# Altium schematic symbol library WR-TBL_Pluggable Connector.SchLib: 879 symbols (part 8 of 15)
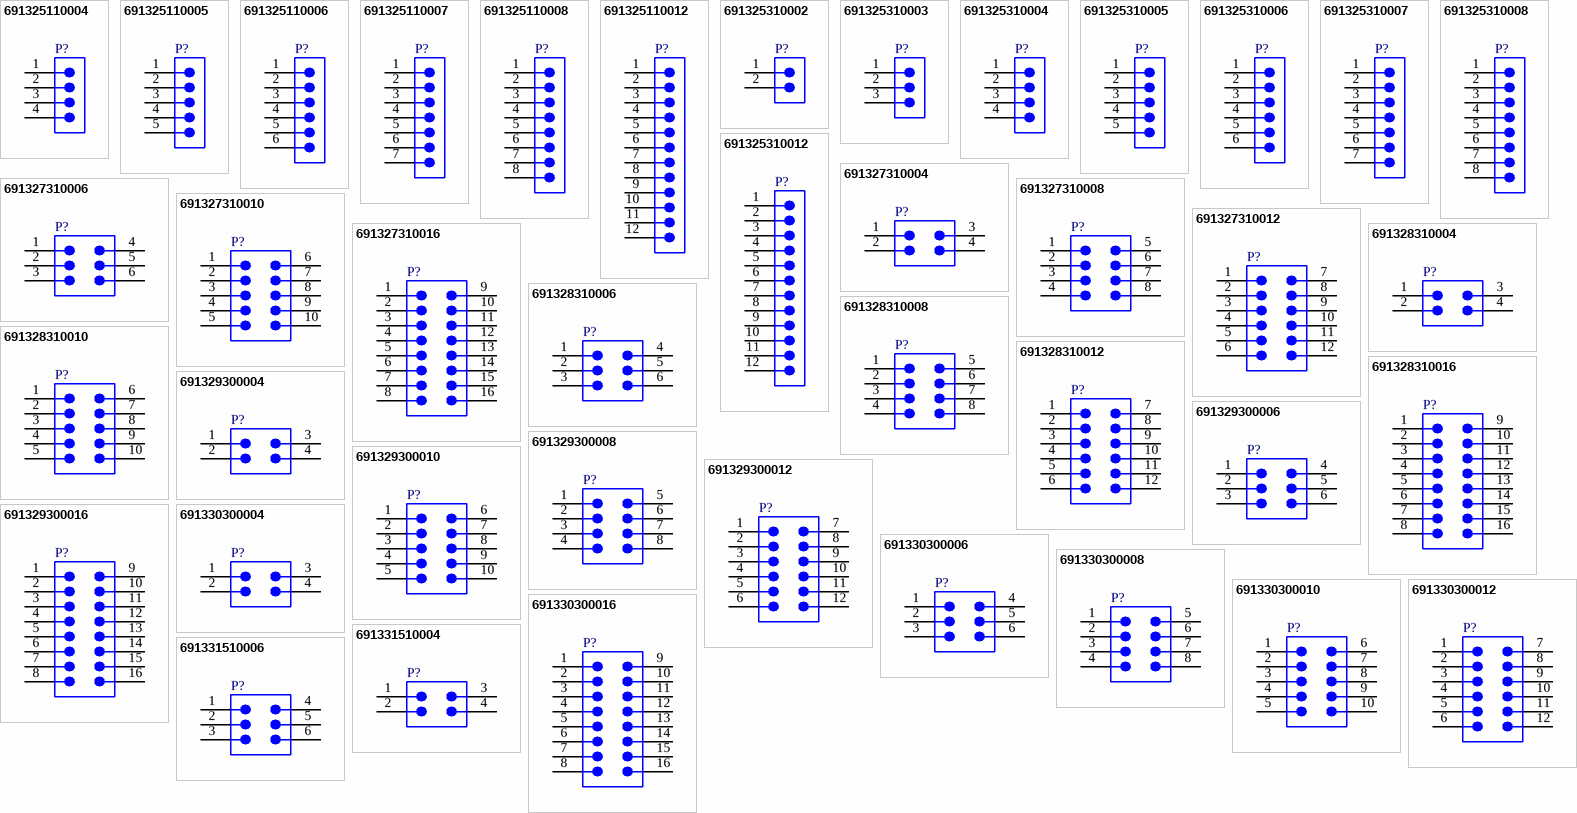
[diagram p28: symbols 691325110004 to 691331510006]

## 691325310004
designator P?  (value not drawn)
WR-TBL Series 3253 Horizontal PCB Header with Flanges, THT, pitch 3.81mm, 04p; Manufacturer: Wurth Elektronik; Modularity: No; Rated Current: 10A; Working Voltage: 300V (AC); Manufacturer Part Number: 691325310004; Product Series: WR-TBL; ComponentLink1Description: Website Link; ComponentLink1URL: https://www.we-online.com; ComponentLink2Description: Datasheet Link; ComponentLink2URL: https://www.we-online.com/components/products/datasheet/691325310004; Mount: Through Hole; Operating Temperature Min: -40degC; Operating Temperature Max: 105degC; Packaging: Box; Application: Pluggable; Number of Pins: 4; Number of Rows: 1; Orientation: Horizontal; Lead Pitch: 3.81mm
footprint 691325310004
pins: 1, 2, 3, 4

## 691325310005
designator P?  (value not drawn)
WR-TBL Series 3253 Horizontal PCB Header with Flanges, THT, pitch 3.81mm, 05p; Manufacturer: Wurth Elektronik; Modularity: No; Rated Current: 10A; Working Voltage: 300V (AC); Manufacturer Part Number: 691325310005; Product Series: WR-TBL; ComponentLink1Description: Website Link; ComponentLink1URL: https://www.we-online.com; ComponentLink2Description: Datasheet Link; ComponentLink2URL: https://www.we-online.com/components/products/datasheet/691325310005; Mount: Through Hole; Operating Temperature Min: -40degC; Operating Temperature Max: 105degC; Packaging: Box; Application: Pluggable; Number of Pins: 5; Number of Rows: 1; Orientation: Horizontal; Lead Pitch: 3.81mm
footprint 691325310005
pins: 1, 2, 3, 4, 5

## 691325310006
designator P?  (value not drawn)
WR-TBL Series 3253 Horizontal PCB Header with Flanges, THT, pitch 3.81mm, 06p; Manufacturer: Wurth Elektronik; Modularity: No; Rated Current: 10A; Working Voltage: 300V (AC); Manufacturer Part Number: 691325310006; Product Series: WR-TBL; ComponentLink1Description: Website Link; ComponentLink1URL: https://www.we-online.com; ComponentLink2Description: Datasheet Link; ComponentLink2URL: https://www.we-online.com/components/products/datasheet/691325310006; Mount: Through Hole; Operating Temperature Min: -40degC; Operating Temperature Max: 105degC; Packaging: Box; Application: Pluggable; Number of Pins: 6; Number of Rows: 1; Orientation: Horizontal; Lead Pitch: 3.81mm
footprint 691325310006
pins: 1, 2, 3, 4, 5, 6

## 691325310007
designator P?  (value not drawn)
WR-TBL Series 3253 Horizontal PCB Header with Flanges, THT, pitch 3.81mm, 07p; Manufacturer: Wurth Elektronik; Modularity: No; Rated Current: 10A; Working Voltage: 300V (AC); Manufacturer Part Number: 691325310007; Product Series: WR-TBL; ComponentLink1Description: Website Link; ComponentLink1URL: https://www.we-online.com; ComponentLink2Description: Datasheet Link; ComponentLink2URL: https://www.we-online.com/components/products/datasheet/691325310007; Mount: Through Hole; Operating Temperature Min: -40degC; Operating Temperature Max: 105degC; Packaging: Box; Application: Pluggable; Number of Pins: 7; Number of Rows: 1; Orientation: Horizontal; Lead Pitch: 3.81mm
footprint 691325310007
pins: 1, 2, 3, 4, 5, 6, 7

## 691325310008
designator P?  (value not drawn)
WR-TBL Series 3253 Horizontal PCB Header with Flanges, THT, pitch 3.81mm, 08p; Manufacturer: Wurth Elektronik; Modularity: No; Rated Current: 10A; Working Voltage: 300V (AC); Manufacturer Part Number: 691325310008; Product Series: WR-TBL; ComponentLink1Description: Website Link; ComponentLink1URL: https://www.we-online.com; ComponentLink2Description: Datasheet Link; ComponentLink2URL: https://www.we-online.com/components/products/datasheet/691325310008; Mount: Through Hole; Operating Temperature Min: -40degC; Operating Temperature Max: 105degC; Packaging: Box; Application: Pluggable; Number of Pins: 8; Number of Rows: 1; Orientation: Horizontal; Lead Pitch: 3.81mm
footprint 691325310008
pins: 1, 2, 3, 4, 5, 6, 7, 8

## 691325310012
designator P?  (value not drawn)
WR-TBL Series 3253 Horizontal PCB Header with Flanges, THT, pitch 3.81mm, 12p; Manufacturer: Wurth Elektronik; Modularity: No; Rated Current: 10A; Working Voltage: 300V (AC); Manufacturer Part Number: 691325310012; Product Series: WR-TBL; ComponentLink1Description: Website Link; ComponentLink1URL: https://www.we-online.com; ComponentLink2Description: Datasheet Link; ComponentLink2URL: https://www.we-online.com/components/products/datasheet/691325310012; Mount: Through Hole; Operating Temperature Min: -40degC; Operating Temperature Max: 105degC; Packaging: Box; Application: Pluggable; Number of Pins: 12; Number of Rows: 1; Orientation: Horizontal; Lead Pitch: 3.81mm
footprint 691325310012
pins: 1, 2, 3, 4, 5, 6, 7, 8, 9, 10, 11, 12

## 691327310004
designator P?  (value not drawn)
WR-TBL Series 3273 Double Level Horizontal PCB Header with Flanges, THT, pitch 3.81mm, 04p; Manufacturer: Wurth Elektronik; Modularity: No; Rated Current: 10A; Working Voltage: 300V (AC); Manufacturer Part Number: 691327310004; Product Series: WR-TBL; ComponentLink1Description: Website Link; ComponentLink1URL: https://www.we-online.com; ComponentLink2Description: Datasheet Link; ComponentLink2URL: https://www.we-online.com/components/products/datasheet/691327310004; Mount: Through Hole; Operating Temperature Min: -40degC; Operating Temperature Max: 105degC; Packaging: Box; Application: Pluggable; Number of Pins: 4; Number of Rows: 2; Orientation: Double Level Horizontal; Lead Pitch: 3.81mm
footprint 691327310004
pins: 1, 2, 3, 4

## 691327310006
designator P?  (value not drawn)
WR-TBL Series 3273 Double Level Horizontal PCB Header with Flanges, THT, pitch 3.81mm, 06p; Manufacturer: Wurth Elektronik; Modularity: No; Rated Current: 10A; Working Voltage: 300V (AC); Manufacturer Part Number: 691327310006; Product Series: WR-TBL; ComponentLink1Description: Website Link; ComponentLink1URL: https://www.we-online.com; ComponentLink2Description: Datasheet Link; ComponentLink2URL: https://www.we-online.com/components/products/datasheet/691327310006; Mount: Through Hole; Operating Temperature Min: -40degC; Operating Temperature Max: 105degC; Packaging: Box; Application: Pluggable; Number of Pins: 6; Number of Rows: 2; Orientation: Double Level Horizontal; Lead Pitch: 3.81mm
footprint 691327310006
pins: 1, 2, 3, 4, 5, 6

## 691327310008
designator P?  (value not drawn)
WR-TBL Series 3273 Double Level Horizontal PCB Header with Flanges, THT, pitch 3.81mm, 08p; Manufacturer: Wurth Elektronik; Modularity: No; Rated Current: 10A; Working Voltage: 300V (AC); Manufacturer Part Number: 691327310008; Product Series: WR-TBL; ComponentLink1Description: Website Link; ComponentLink1URL: https://www.we-online.com; ComponentLink2Description: Datasheet Link; ComponentLink2URL: https://www.we-online.com/components/products/datasheet/691327310008; Mount: Through Hole; Operating Temperature Min: -40degC; Operating Temperature Max: 105degC; Packaging: Box; Application: Pluggable; Number of Pins: 8; Number of Rows: 2; Orientation: Double Level Horizontal; Lead Pitch: 3.81mm
footprint 691327310008
pins: 1, 2, 3, 4, 5, 6, 7, 8

## 691327310010
designator P?  (value not drawn)
WR-TBL Series 3273 Double Level Horizontal PCB Header with Flanges, THT, pitch 3.81mm, 10p; Manufacturer: Wurth Elektronik; Modularity: No; Rated Current: 10A; Working Voltage: 300V (AC); Manufacturer Part Number: 691327310010; Product Series: WR-TBL; ComponentLink1Description: Website Link; ComponentLink1URL: https://www.we-online.com; ComponentLink2Description: Datasheet Link; ComponentLink2URL: https://www.we-online.com/components/products/datasheet/691327310010; Mount: Through Hole; Operating Temperature Min: -40degC; Operating Temperature Max: 105degC; Packaging: Box; Application: Pluggable; Number of Pins: 10; Number of Rows: 2; Orientation: Double Level Horizontal; Lead Pitch: 3.81mm
footprint 691327310010
pins: 1, 2, 3, 4, 5, 6, 7, 8, 9, 10

## 691327310012
designator P?  (value not drawn)
WR-TBL Series 3273 Double Level Horizontal PCB Header with Flanges, THT, pitch 3.81mm, 12p; Manufacturer: Wurth Elektronik; Modularity: No; Rated Current: 10A; Working Voltage: 300V (AC); Manufacturer Part Number: 691327310012; Product Series: WR-TBL; ComponentLink1Description: Website Link; ComponentLink1URL: https://www.we-online.com; ComponentLink2Description: Datasheet Link; ComponentLink2URL: https://www.we-online.com/components/products/datasheet/691327310012; Mount: Through Hole; Operating Temperature Min: -40degC; Operating Temperature Max: 105degC; Packaging: Box; Application: Pluggable; Number of Pins: 12; Number of Rows: 2; Orientation: Double Level Horizontal; Lead Pitch: 3.81mm
footprint 691327310012
pins: 1, 2, 3, 4, 5, 6, 7, 8, 9, 10, 11, 12

## 691327310016
designator P?  (value not drawn)
WR-TBL Series 3273 Double Level Horizontal PCB Header with Flanges, THT, pitch 3.81mm, 16p; Manufacturer: Wurth Elektronik; Modularity: No; Rated Current: 10A; Working Voltage: 300V (AC); Manufacturer Part Number: 691327310016; Product Series: WR-TBL; ComponentLink1Description: Website Link; ComponentLink1URL: https://www.we-online.com; ComponentLink2Description: Datasheet Link; ComponentLink2URL: https://www.we-online.com/components/products/datasheet/691327310016; Mount: Through Hole; Operating Temperature Min: -40degC; Operating Temperature Max: 105degC; Packaging: Box; Application: Pluggable; Number of Pins: 16; Number of Rows: 2; Orientation: Double Level Horizontal; Lead Pitch: 3.81mm
footprint 691327310016
pins: 1, 2, 3, 4, 5, 6, 7, 8, 9, 10, 11, 12, 13, 14, 15, 16

## 691328310004
designator P?  (value not drawn)
WR-TBL Series 3283 Double Level Horizontal PCB Header with Flanges & Nut Type, THT, pitch 3.81mm, 04p; Manufacturer: Wurth Elektronik; Modularity: No; Rated Current: 10A; Working Voltage: 300V (AC); Manufacturer Part Number: 691328310004; Product Series: WR-TBL; ComponentLink1Description: Website Link; ComponentLink1URL: https://www.we-online.com; ComponentLink2Description: Datasheet Link; ComponentLink2URL: https://www.we-online.com/components/products/datasheet/691328310004; Mount: Through Hole; Operating Temperature Min: -40degC; Operating Temperature Max: 105degC; Packaging: Box; Application: Pluggable; Number of Pins: 4; Number of Rows: 2; Orientation: Double Level Horizontal; Lead Pitch: 3.81mm
footprint 691328310004
pins: 1, 2, 3, 4

## 691328310006
designator P?  (value not drawn)
WR-TBL Series 3283 Double Level Horizontal PCB Header with Flanges & Nut Type, THT, pitch 3.81mm, 06p; Manufacturer: Wurth Elektronik; Modularity: No; Rated Current: 10A; Working Voltage: 300V (AC); Manufacturer Part Number: 691328310006; Product Series: WR-TBL; ComponentLink1Description: Website Link; ComponentLink1URL: https://www.we-online.com; ComponentLink2Description: Datasheet Link; ComponentLink2URL: https://www.we-online.com/components/products/datasheet/691328310006; Mount: Through Hole; Operating Temperature Min: -40degC; Operating Temperature Max: 105degC; Packaging: Box; Application: Pluggable; Number of Pins: 6; Number of Rows: 2; Orientation: Double Level Horizontal; Lead Pitch: 3.81mm
footprint 691328310006
pins: 1, 2, 3, 4, 5, 6

## 691328310008
designator P?  (value not drawn)
WR-TBL Series 3283 Double Level Horizontal PCB Header with Flanges & Nut Type, THT, pitch 3.81mm, 08p; Manufacturer: Wurth Elektronik; Modularity: No; Rated Current: 10A; Working Voltage: 300V (AC); Manufacturer Part Number: 691328310008; Product Series: WR-TBL; ComponentLink1Description: Website Link; ComponentLink1URL: https://www.we-online.com; ComponentLink2Description: Datasheet Link; ComponentLink2URL: https://www.we-online.com/components/products/datasheet/691328310008; Mount: Through Hole; Operating Temperature Min: -40degC; Operating Temperature Max: 105degC; Packaging: Box; Application: Pluggable; Number of Pins: 8; Number of Rows: 2; Orientation: Double Level Horizontal; Lead Pitch: 3.81mm
footprint 691328310008
pins: 1, 2, 3, 4, 5, 6, 7, 8

## 691328310010
designator P?  (value not drawn)
WR-TBL Series 3283 Double Level Horizontal PCB Header with Flanges & Nut Type, THT, pitch 3.81mm, 10p; Manufacturer: Wurth Elektronik; Modularity: No; Rated Current: 10A; Working Voltage: 300V (AC); Manufacturer Part Number: 691328310010; Product Series: WR-TBL; ComponentLink1Description: Website Link; ComponentLink1URL: https://www.we-online.com; ComponentLink2Description: Datasheet Link; ComponentLink2URL: https://www.we-online.com/components/products/datasheet/691328310010; Mount: Through Hole; Operating Temperature Min: -40degC; Operating Temperature Max: 105degC; Packaging: Box; Application: Pluggable; Number of Pins: 10; Number of Rows: 2; Orientation: Double Level Horizontal; Lead Pitch: 3.81mm
footprint 691328310010
pins: 1, 2, 3, 4, 5, 6, 7, 8, 9, 10

## 691328310012
designator P?  (value not drawn)
WR-TBL Series 3283 Double Level Horizontal PCB Header with Flanges & Nut Type, THT, pitch 3.81mm, 12p; Manufacturer: Wurth Elektronik; Modularity: No; Rated Current: 10A; Working Voltage: 300V (AC); Manufacturer Part Number: 691328310012; Product Series: WR-TBL; ComponentLink1Description: Website Link; ComponentLink1URL: https://www.we-online.com; ComponentLink2Description: Datasheet Link; ComponentLink2URL: https://www.we-online.com/components/products/datasheet/691328310012; Mount: Through Hole; Operating Temperature Min: -40degC; Operating Temperature Max: 105degC; Packaging: Box; Application: Pluggable; Number of Pins: 12; Number of Rows: 2; Orientation: Double Level Horizontal; Lead Pitch: 3.81mm
footprint 691328310012
pins: 1, 2, 3, 4, 5, 6, 7, 8, 9, 10, 11, 12

## 691328310016
designator P?  (value not drawn)
WR-TBL Series 3283 Double Level Horizontal PCB Header with Flanges & Nut Type, THT, pitch 3.81mm, 16p; Manufacturer: Wurth Elektronik; Modularity: No; Rated Current: 10A; Working Voltage: 300V (AC); Manufacturer Part Number: 691328310016; Product Series: WR-TBL; ComponentLink1Description: Website Link; ComponentLink1URL: https://www.we-online.com; ComponentLink2Description: Datasheet Link; ComponentLink2URL: https://www.we-online.com/components/products/datasheet/691328310016; Mount: Through Hole; Operating Temperature Min: -40degC; Operating Temperature Max: 105degC; Packaging: Box; Application: Pluggable; Number of Pins: 16; Number of Rows: 2; Orientation: Double Level Horizontal; Lead Pitch: 3.81mm
footprint 691328310016
pins: 1, 2, 3, 4, 5, 6, 7, 8, 9, 10, 11, 12, 13, 14, 15, 16

## 691329300004
designator P?  (value not drawn)
WR-TBL Series 3293 Double Level Vertical PCB Header, THT, pitch 3.81mm, 04p; Manufacturer: Wurth Elektronik; Modularity: No; Rated Current: 10A; Working Voltage: 300V (AC); Manufacturer Part Number: 691329300004; Product Series: WR-TBL; ComponentLink1Description: Website Link; ComponentLink1URL: https://www.we-online.com; ComponentLink2Description: Datasheet Link; ComponentLink2URL: https://www.we-online.com/components/products/datasheet/691329300004; Mount: Through Hole; Operating Temperature Min: -40degC; Operating Temperature Max: 105degC; Packaging: Box; Application: Pluggable; Number of Pins: 4; Number of Rows: 2; Orientation: Double Level Vertical; Lead Pitch: 3.81mm
footprint 691329300004
pins: 1, 2, 3, 4

## 691329300006
designator P?  (value not drawn)
WR-TBL Series 3293 Double Level Vertical PCB Header, THT, pitch 3.81mm, 06p; Manufacturer: Wurth Elektronik; Modularity: No; Rated Current: 10A; Working Voltage: 300V (AC); Manufacturer Part Number: 691329300006; Product Series: WR-TBL; ComponentLink1Description: Website Link; ComponentLink1URL: https://www.we-online.com; ComponentLink2Description: Datasheet Link; ComponentLink2URL: https://www.we-online.com/components/products/datasheet/691329300006; Mount: Through Hole; Operating Temperature Min: -40degC; Operating Temperature Max: 105degC; Packaging: Box; Application: Pluggable; Number of Pins: 6; Number of Rows: 2; Orientation: Double Level Vertical; Lead Pitch: 3.81mm
footprint 691329300006
pins: 1, 2, 3, 4, 5, 6

## 691329300008
designator P?  (value not drawn)
WR-TBL Series 3293 Double Level Vertical PCB Header, THT, pitch 3.81mm, 08p; Manufacturer: Wurth Elektronik; Modularity: No; Rated Current: 10A; Working Voltage: 300V (AC); Manufacturer Part Number: 691329300008; Product Series: WR-TBL; ComponentLink1Description: Website Link; ComponentLink1URL: https://www.we-online.com; ComponentLink2Description: Datasheet Link; ComponentLink2URL: https://www.we-online.com/components/products/datasheet/691329300008; Mount: Through Hole; Operating Temperature Min: -40degC; Operating Temperature Max: 105degC; Packaging: Box; Application: Pluggable; Number of Pins: 8; Number of Rows: 2; Orientation: Double Level Vertical; Lead Pitch: 3.81mm
footprint 691329300008
pins: 1, 2, 3, 4, 5, 6, 7, 8

## 691329300010
designator P?  (value not drawn)
WR-TBL Series 3293 Double Level Vertical PCB Header, THT, pitch 3.81mm, 10p; Manufacturer: Wurth Elektronik; Modularity: No; Rated Current: 10A; Working Voltage: 300V (AC); Manufacturer Part Number: 691329300010; Product Series: WR-TBL; ComponentLink1Description: Website Link; ComponentLink1URL: https://www.we-online.com; ComponentLink2Description: Datasheet Link; ComponentLink2URL: https://www.we-online.com/components/products/datasheet/691329300010; Mount: Through Hole; Operating Temperature Min: -40degC; Operating Temperature Max: 105degC; Packaging: Box; Application: Pluggable; Number of Pins: 10; Number of Rows: 2; Orientation: Double Level Vertical; Lead Pitch: 3.81mm
footprint 691329300010
pins: 1, 2, 3, 4, 5, 6, 7, 8, 9, 10

## 691329300012
designator P?  (value not drawn)
WR-TBL Series 3293 Double Level Vertical PCB Header, THT, pitch 3.81mm, 12p; Manufacturer: Wurth Elektronik; Modularity: No; Rated Current: 10A; Working Voltage: 300V (AC); Manufacturer Part Number: 691329300012; Product Series: WR-TBL; ComponentLink1Description: Website Link; ComponentLink1URL: https://www.we-online.com; ComponentLink2Description: Datasheet Link; ComponentLink2URL: https://www.we-online.com/components/products/datasheet/691329300012; Mount: Through Hole; Operating Temperature Min: -40degC; Operating Temperature Max: 105degC; Packaging: Box; Application: Pluggable; Number of Pins: 12; Number of Rows: 2; Orientation: Double Level Vertical; Lead Pitch: 3.81mm
footprint 691329300012
pins: 1, 2, 3, 4, 5, 6, 7, 8, 9, 10, 11, 12

## 691329300016
designator P?  (value not drawn)
WR-TBL Series 3293 Double Level Vertical PCB Header, THT, pitch 3.81mm, 16p; Manufacturer: Wurth Elektronik; Modularity: No; Rated Current: 10A; Working Voltage: 300V (AC); Manufacturer Part Number: 691329300016; Product Series: WR-TBL; ComponentLink1Description: Website Link; ComponentLink1URL: https://www.we-online.com; ComponentLink2Description: Datasheet Link; ComponentLink2URL: https://www.we-online.com/components/products/datasheet/691329300016; Mount: Through Hole; Operating Temperature Min: -40degC; Operating Temperature Max: 105degC; Packaging: Box; Application: Pluggable; Number of Pins: 16; Number of Rows: 2; Orientation: Double Level Vertical; Lead Pitch: 3.81mm
footprint 691329300016
pins: 1, 2, 3, 4, 5, 6, 7, 8, 9, 10, 11, 12, 13, 14, 15, 16

## 691330300004
designator P?  (value not drawn)
WR-TBL Series 3303 Double Level Vertical PCB Header with Flanges & Nut Type, THT, pitch 3.81mm, 04p; Manufacturer: Wurth Elektronik; Modularity: No; Rated Current: 10A; Working Voltage: 300V (AC); Manufacturer Part Number: 691330300004; Product Series: WR-TBL; ComponentLink1Description: Website Link; ComponentLink1URL: https://www.we-online.com; ComponentLink2Description: Datasheet Link; ComponentLink2URL: https://www.we-online.com/components/products/datasheet/691330300004; Mount: Through Hole; Operating Temperature Min: -40degC; Operating Temperature Max: 105degC; Packaging: Box; Application: Pluggable; Number of Pins: 4; Number of Rows: 2; Orientation: Double Level Vertical; Lead Pitch: 3.81mm
footprint 691330300004
pins: 1, 2, 3, 4

## 691330300006
designator P?  (value not drawn)
WR-TBL Series 3303 Double Level Vertical PCB Header with Flanges & Nut Type, THT, pitch 3.81mm, 06p; Manufacturer: Wurth Elektronik; Modularity: No; Rated Current: 10A; Working Voltage: 300V (AC); Manufacturer Part Number: 691330300006; Product Series: WR-TBL; ComponentLink1Description: Website Link; ComponentLink1URL: https://www.we-online.com; ComponentLink2Description: Datasheet Link; ComponentLink2URL: https://www.we-online.com/components/products/datasheet/691330300006; Mount: Through Hole; Operating Temperature Min: -40degC; Operating Temperature Max: 105degC; Packaging: Box; Application: Pluggable; Number of Pins: 6; Number of Rows: 2; Orientation: Double Level Vertical; Lead Pitch: 3.81mm
footprint 691330300006
pins: 1, 2, 3, 4, 5, 6

## 691330300008
designator P?  (value not drawn)
WR-TBL Series 3303 Double Level Vertical PCB Header with Flanges & Nut Type, THT, pitch 3.81mm, 08p; Manufacturer: Wurth Elektronik; Modularity: No; Rated Current: 10A; Working Voltage: 300V (AC); Manufacturer Part Number: 691330300008; Product Series: WR-TBL; ComponentLink1Description: Website Link; ComponentLink1URL: https://www.we-online.com; ComponentLink2Description: Datasheet Link; ComponentLink2URL: https://www.we-online.com/components/products/datasheet/691330300008; Mount: Through Hole; Operating Temperature Min: -40degC; Operating Temperature Max: 105degC; Packaging: Box; Application: Pluggable; Number of Pins: 8; Number of Rows: 2; Orientation: Double Level Vertical; Lead Pitch: 3.81mm
footprint 691330300008
pins: 1, 2, 3, 4, 5, 6, 7, 8

## 691330300010
designator P?  (value not drawn)
WR-TBL Series 3303 Double Level Vertical PCB Header with Flanges & Nut Type, THT, pitch 3.81mm, 10p; Manufacturer: Wurth Elektronik; Modularity: No; Rated Current: 10A; Working Voltage: 300V (AC); Manufacturer Part Number: 691330300010; Product Series: WR-TBL; ComponentLink1Description: Website Link; ComponentLink1URL: https://www.we-online.com; ComponentLink2Description: Datasheet Link; ComponentLink2URL: https://www.we-online.com/components/products/datasheet/691330300010; Mount: Through Hole; Operating Temperature Min: -40degC; Operating Temperature Max: 105degC; Packaging: Box; Application: Pluggable; Number of Pins: 10; Number of Rows: 2; Orientation: Double Level Vertical; Lead Pitch: 3.81mm
footprint 691330300010
pins: 1, 2, 3, 4, 5, 6, 7, 8, 9, 10

## 691330300012
designator P?  (value not drawn)
WR-TBL Series 3303 Double Level Vertical PCB Header with Flanges & Nut Type, THT, pitch 3.81mm, 12p; Manufacturer: Wurth Elektronik; Modularity: No; Rated Current: 10A; Working Voltage: 300V (AC); Manufacturer Part Number: 691330300012; Product Series: WR-TBL; ComponentLink1Description: Website Link; ComponentLink1URL: https://www.we-online.com; ComponentLink2Description: Datasheet Link; ComponentLink2URL: https://www.we-online.com/components/products/datasheet/691330300012; Mount: Through Hole; Operating Temperature Min: -40degC; Operating Temperature Max: 105degC; Packaging: Box; Application: Pluggable; Number of Pins: 12; Number of Rows: 2; Orientation: Double Level Vertical; Lead Pitch: 3.81mm
footprint 691330300012
pins: 1, 2, 3, 4, 5, 6, 7, 8, 9, 10, 11, 12

## 691330300016
designator P?  (value not drawn)
WR-TBL Series 3303 Double Level Vertical PCB Header with Flanges & Nut Type, THT, pitch 3.81mm, 16p; Manufacturer: Wurth Elektronik; Modularity: No; Rated Current: 10A; Working Voltage: 300V (AC); Manufacturer Part Number: 691330300016; Product Series: WR-TBL; ComponentLink1Description: Website Link; ComponentLink1URL: https://www.we-online.com; ComponentLink2Description: Datasheet Link; ComponentLink2URL: https://www.we-online.com/components/products/datasheet/691330300016; Mount: Through Hole; Operating Temperature Min: -40degC; Operating Temperature Max: 105degC; Packaging: Box; Application: Pluggable; Number of Pins: 16; Number of Rows: 2; Orientation: Double Level Vertical; Lead Pitch: 3.81mm
footprint 691330300016
pins: 1, 2, 3, 4, 5, 6, 7, 8, 9, 10, 11, 12, 13, 14, 15, 16

## 691331510004
designator P?  (value not drawn)
WR-TBL Series 3315 Double Level Horizontal PCB Header with Flanges, THT, pitch 5.08mm, 04p; Manufacturer: Wurth Elektronik; Modularity: No; Rated Current: 20A; Working Voltage: 300V (AC); Manufacturer Part Number: 691331510004; Product Series: WR-TBL; ComponentLink1Description: Website Link; ComponentLink1URL: https://www.we-online.com; ComponentLink2Description: Datasheet Link; ComponentLink2URL: https://www.we-online.com/components/products/datasheet/691331510004; Mount: Through Hole; Operating Temperature Min: -40degC; Operating Temperature Max: 105degC; Packaging: Box; Application: Pluggable; Number of Pins: 4; Number of Rows: 2; Orientation: Double Level Horizontal; Lead Pitch: 5.08mm
footprint 691331510004
pins: 1, 2, 3, 4

## 691331510006
designator P?  (value not drawn)
WR-TBL Series 3315 Double Level Horizontal PCB Header with Flanges, THT, pitch 5.08mm, 06p; Manufacturer: Wurth Elektronik; Modularity: No; Rated Current: 20A; Working Voltage: 300V (AC); Manufacturer Part Number: 691331510006; Product Series: WR-TBL; ComponentLink1Description: Website Link; ComponentLink1URL: https://www.we-online.com; ComponentLink2Description: Datasheet Link; ComponentLink2URL: https://www.we-online.com/components/products/datasheet/691331510006; Mount: Through Hole; Operating Temperature Min: -40degC; Operating Temperature Max: 105degC; Packaging: Box; Application: Pluggable; Number of Pins: 6; Number of Rows: 2; Orientation: Double Level Horizontal; Lead Pitch: 5.08mm
footprint 691331510006
pins: 1, 2, 3, 4, 5, 6

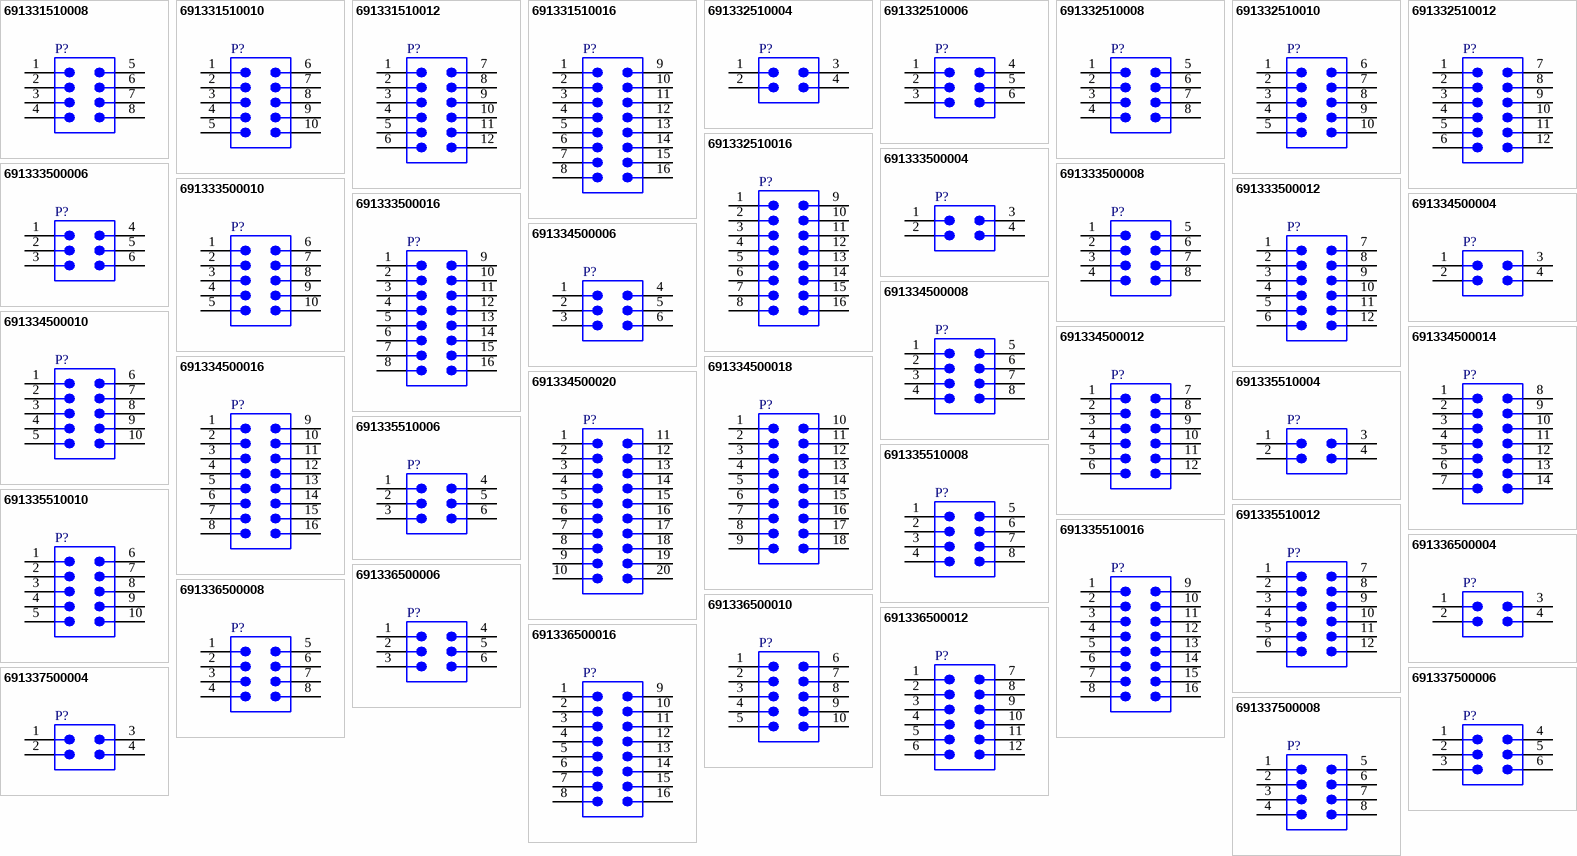
[diagram p12: symbols 691331510008 to 691337500008]

## 691331510008
designator P?  (value not drawn)
WR-TBL Series 3315 Double Level Horizontal PCB Header with Flanges, THT, pitch 5.08mm, 08p; Manufacturer: Wurth Elektronik; Modularity: No; Rated Current: 20A; Working Voltage: 300V (AC); Manufacturer Part Number: 691331510008; Product Series: WR-TBL; ComponentLink1Description: Website Link; ComponentLink1URL: https://www.we-online.com; ComponentLink2Description: Datasheet Link; ComponentLink2URL: https://www.we-online.com/components/products/datasheet/691331510008; Mount: Through Hole; Operating Temperature Min: -40degC; Operating Temperature Max: 105degC; Packaging: Box; Application: Pluggable; Number of Pins: 8; Number of Rows: 2; Orientation: Double Level Horizontal; Lead Pitch: 5.08mm
footprint 691331510008
pins: 1, 2, 3, 4, 5, 6, 7, 8

## 691331510010
designator P?  (value not drawn)
WR-TBL Series 3315 Double Level Horizontal PCB Header with Flanges, THT, pitch 5.08mm, 10p; Manufacturer: Wurth Elektronik; Modularity: No; Rated Current: 20A; Working Voltage: 300V (AC); Manufacturer Part Number: 691331510010; Product Series: WR-TBL; ComponentLink1Description: Website Link; ComponentLink1URL: https://www.we-online.com; ComponentLink2Description: Datasheet Link; ComponentLink2URL: https://www.we-online.com/components/products/datasheet/691331510010; Mount: Through Hole; Operating Temperature Min: -40degC; Operating Temperature Max: 105degC; Packaging: Box; Application: Pluggable; Number of Pins: 10; Number of Rows: 2; Orientation: Double Level Horizontal; Lead Pitch: 5.08mm
footprint 691331510010
pins: 1, 2, 3, 4, 5, 6, 7, 8, 9, 10

## 691331510012
designator P?  (value not drawn)
WR-TBL Series 3315 Double Level Horizontal PCB Header with Flanges, THT, pitch 5.08mm, 12p; Manufacturer: Wurth Elektronik; Modularity: No; Rated Current: 20A; Working Voltage: 300V (AC); Manufacturer Part Number: 691331510012; Product Series: WR-TBL; ComponentLink1Description: Website Link; ComponentLink1URL: https://www.we-online.com; ComponentLink2Description: Datasheet Link; ComponentLink2URL: https://www.we-online.com/components/products/datasheet/691331510012; Mount: Through Hole; Operating Temperature Min: -40degC; Operating Temperature Max: 105degC; Packaging: Box; Application: Pluggable; Number of Pins: 12; Number of Rows: 2; Orientation: Double Level Horizontal; Lead Pitch: 5.08mm
footprint 691331510012
pins: 1, 2, 3, 4, 5, 6, 7, 8, 9, 10, 11, 12

## 691331510016
designator P?  (value not drawn)
WR-TBL Series 3315 Double Level Horizontal PCB Header with Flanges, THT, pitch 5.08mm, 16p; Manufacturer: Wurth Elektronik; Modularity: No; Rated Current: 20A; Working Voltage: 300V (AC); Manufacturer Part Number: 691331510016; Product Series: WR-TBL; ComponentLink1Description: Website Link; ComponentLink1URL: https://www.we-online.com; ComponentLink2Description: Datasheet Link; ComponentLink2URL: https://www.we-online.com/components/products/datasheet/691331510016; Mount: Through Hole; Operating Temperature Min: -40degC; Operating Temperature Max: 105degC; Packaging: Box; Application: Pluggable; Number of Pins: 16; Number of Rows: 2; Orientation: Double Level Horizontal; Lead Pitch: 5.08mm
footprint 691331510016
pins: 1, 2, 3, 4, 5, 6, 7, 8, 9, 10, 11, 12, 13, 14, 15, 16

## 691332510004
designator P?  (value not drawn)
WR-TBL Series 3325 Double Level Horizontal PCB Header with Flanges & Nut Type, THT, pitch 5.08mm, 04p; Manufacturer: Wurth Elektronik; Modularity: No; Rated Current: 20A; Working Voltage: 300V (AC); Manufacturer Part Number: 691332510004; Product Series: WR-TBL; ComponentLink1Description: Website Link; ComponentLink1URL: https://www.we-online.com; ComponentLink2Description: Datasheet Link; ComponentLink2URL: https://www.we-online.com/components/products/datasheet/691332510004; Mount: Through Hole; Operating Temperature Min: -40degC; Operating Temperature Max: 105degC; Packaging: Box; Application: Pluggable; Number of Pins: 4; Number of Rows: 2; Orientation: Double Level Horizontal; Lead Pitch: 5.08mm
footprint 691332510004
pins: 1, 2, 3, 4

## 691332510006
designator P?  (value not drawn)
WR-TBL Series 3325 Double Level Horizontal PCB Header with Flanges & Nut Type, THT, pitch 5.08mm, 06p; Manufacturer: Wurth Elektronik; Modularity: No; Rated Current: 20A; Working Voltage: 300V (AC); Manufacturer Part Number: 691332510006; Product Series: WR-TBL; ComponentLink1Description: Website Link; ComponentLink1URL: https://www.we-online.com; ComponentLink2Description: Datasheet Link; ComponentLink2URL: https://www.we-online.com/components/products/datasheet/691332510006; Mount: Through Hole; Operating Temperature Min: -40degC; Operating Temperature Max: 105degC; Packaging: Box; Application: Pluggable; Number of Pins: 6; Number of Rows: 2; Orientation: Double Level Horizontal; Lead Pitch: 5.08mm
footprint 691332510006
pins: 1, 2, 3, 4, 5, 6

## 691332510008
designator P?  (value not drawn)
WR-TBL Series 3325 Double Level Horizontal PCB Header with Flanges & Nut Type, THT, pitch 5.08mm, 08p; Manufacturer: Wurth Elektronik; Modularity: No; Rated Current: 20A; Working Voltage: 300V (AC); Manufacturer Part Number: 691332510008; Product Series: WR-TBL; ComponentLink1Description: Website Link; ComponentLink1URL: https://www.we-online.com; ComponentLink2Description: Datasheet Link; ComponentLink2URL: https://www.we-online.com/components/products/datasheet/691332510008; Mount: Through Hole; Operating Temperature Min: -40degC; Operating Temperature Max: 105degC; Packaging: Box; Application: Pluggable; Number of Pins: 8; Number of Rows: 2; Orientation: Double Level Horizontal; Lead Pitch: 5.08mm
footprint 691332510008
pins: 1, 2, 3, 4, 5, 6, 7, 8

## 691332510010
designator P?  (value not drawn)
WR-TBL Series 3325 Double Level Horizontal PCB Header with Flanges & Nut Type, THT, pitch 5.08mm, 10p; Manufacturer: Wurth Elektronik; Modularity: No; Rated Current: 20A; Working Voltage: 300V (AC); Manufacturer Part Number: 691332510010; Product Series: WR-TBL; ComponentLink1Description: Website Link; ComponentLink1URL: https://www.we-online.com; ComponentLink2Description: Datasheet Link; ComponentLink2URL: https://www.we-online.com/components/products/datasheet/691332510010; Mount: Through Hole; Operating Temperature Min: -40degC; Operating Temperature Max: 105degC; Packaging: Box; Application: Pluggable; Number of Pins: 10; Number of Rows: 2; Orientation: Double Level Horizontal; Lead Pitch: 5.08mm
footprint 691332510010
pins: 1, 2, 3, 4, 5, 6, 7, 8, 9, 10

## 691332510012
designator P?  (value not drawn)
WR-TBL Series 3325 Double Level Horizontal PCB Header with Flanges & Nut Type, THT, pitch 5.08mm, 12p; Manufacturer: Wurth Elektronik; Modularity: No; Rated Current: 20A; Working Voltage: 300V (AC); Manufacturer Part Number: 691332510012; Product Series: WR-TBL; ComponentLink1Description: Website Link; ComponentLink1URL: https://www.we-online.com; ComponentLink2Description: Datasheet Link; ComponentLink2URL: https://www.we-online.com/components/products/datasheet/691332510012; Mount: Through Hole; Operating Temperature Min: -40degC; Operating Temperature Max: 105degC; Packaging: Box; Application: Pluggable; Number of Pins: 12; Number of Rows: 2; Orientation: Double Level Horizontal; Lead Pitch: 5.08mm
footprint 691332510012
pins: 1, 2, 3, 4, 5, 6, 7, 8, 9, 10, 11, 12

## 691332510016
designator P?  (value not drawn)
WR-TBL Series 3325 Double Level Horizontal PCB Header with Flanges & Nut Type, THT, pitch 5.08mm, 16p; Manufacturer: Wurth Elektronik; Modularity: No; Rated Current: 20A; Working Voltage: 300V (AC); Manufacturer Part Number: 691332510016; Product Series: WR-TBL; ComponentLink1Description: Website Link; ComponentLink1URL: https://www.we-online.com; ComponentLink2Description: Datasheet Link; ComponentLink2URL: https://www.we-online.com/components/products/datasheet/691332510016; Mount: Through Hole; Operating Temperature Min: -40degC; Operating Temperature Max: 105degC; Packaging: Box; Application: Pluggable; Number of Pins: 16; Number of Rows: 2; Orientation: Double Level Horizontal; Lead Pitch: 5.08mm
footprint 691332510016
pins: 1, 2, 3, 4, 5, 6, 7, 8, 9, 10, 11, 12, 13, 14, 15, 16

## 691333500004
designator P?  (value not drawn)
WR-TBL Series 3335 Double Level Vertical PCB Header with Flanges, THT, pitch 5.08mm, 04p; Manufacturer: Wurth Elektronik; Modularity: No; Rated Current: 20A; Working Voltage: 300V (AC); Manufacturer Part Number: 691333500004; Product Series: WR-TBL; ComponentLink1Description: Website Link; ComponentLink1URL: https://www.we-online.com; ComponentLink2Description: Datasheet Link; ComponentLink2URL: https://www.we-online.com/components/products/datasheet/691333500004; Mount: Through Hole; Operating Temperature Min: -40degC; Operating Temperature Max: 105degC; Packaging: Box; Application: Pluggable; Number of Pins: 4; Number of Rows: 2; Orientation: Double Level Vertical; Lead Pitch: 5.08mm
footprint 691333500004
pins: 1, 2, 3, 4

## 691333500006
designator P?  (value not drawn)
WR-TBL Series 3335 Double Level Vertical PCB Header with Flanges, THT, pitch 5.08mm, 06p; Manufacturer: Wurth Elektronik; Modularity: No; Rated Current: 20A; Working Voltage: 300V (AC); Manufacturer Part Number: 691333500006; Product Series: WR-TBL; ComponentLink1Description: Website Link; ComponentLink1URL: https://www.we-online.com; ComponentLink2Description: Datasheet Link; ComponentLink2URL: https://www.we-online.com/components/products/datasheet/691333500006; Mount: Through Hole; Operating Temperature Min: -40degC; Operating Temperature Max: 105degC; Packaging: Box; Application: Pluggable; Number of Pins: 6; Number of Rows: 2; Orientation: Double Level Vertical; Lead Pitch: 5.08mm
footprint 691333500006
pins: 1, 2, 3, 4, 5, 6

## 691333500008
designator P?  (value not drawn)
WR-TBL Series 3335 Double Level Vertical PCB Header with Flanges, THT, pitch 5.08mm, 08p; Manufacturer: Wurth Elektronik; Modularity: No; Rated Current: 20A; Working Voltage: 300V (AC); Manufacturer Part Number: 691333500008; Product Series: WR-TBL; ComponentLink1Description: Website Link; ComponentLink1URL: https://www.we-online.com; ComponentLink2Description: Datasheet Link; ComponentLink2URL: https://www.we-online.com/components/products/datasheet/691333500008; Mount: Through Hole; Operating Temperature Min: -40degC; Operating Temperature Max: 105degC; Packaging: Box; Application: Pluggable; Number of Pins: 8; Number of Rows: 2; Orientation: Double Level Vertical; Lead Pitch: 5.08mm
footprint 691333500008
pins: 1, 2, 3, 4, 5, 6, 7, 8

## 691333500010
designator P?  (value not drawn)
WR-TBL Series 3335 Double Level Vertical PCB Header with Flanges, THT, pitch 5.08mm, 10p; Manufacturer: Wurth Elektronik; Modularity: No; Rated Current: 20A; Working Voltage: 300V (AC); Manufacturer Part Number: 691333500010; Product Series: WR-TBL; ComponentLink1Description: Website Link; ComponentLink1URL: https://www.we-online.com; ComponentLink2Description: Datasheet Link; ComponentLink2URL: https://www.we-online.com/components/products/datasheet/691333500010; Mount: Through Hole; Operating Temperature Min: -40degC; Operating Temperature Max: 105degC; Packaging: Box; Application: Pluggable; Number of Pins: 10; Number of Rows: 2; Orientation: Double Level Vertical; Lead Pitch: 5.08mm
footprint 691333500010
pins: 1, 2, 3, 4, 5, 6, 7, 8, 9, 10

## 691333500012
designator P?  (value not drawn)
WR-TBL Series 3335 Double Level Vertical PCB Header with Flanges, THT, pitch 5.08mm, 12p; Manufacturer: Wurth Elektronik; Modularity: No; Rated Current: 20A; Working Voltage: 300V (AC); Manufacturer Part Number: 691333500012; Product Series: WR-TBL; ComponentLink1Description: Website Link; ComponentLink1URL: https://www.we-online.com; ComponentLink2Description: Datasheet Link; ComponentLink2URL: https://www.we-online.com/components/products/datasheet/691333500012; Mount: Through Hole; Operating Temperature Min: -40degC; Operating Temperature Max: 105degC; Packaging: Box; Application: Pluggable; Number of Pins: 12; Number of Rows: 2; Orientation: Double Level Vertical; Lead Pitch: 5.08mm
footprint 691333500012
pins: 1, 2, 3, 4, 5, 6, 7, 8, 9, 10, 11, 12

## 691333500016
designator P?  (value not drawn)
WR-TBL Series 3335 Double Level Vertical PCB Header with Flanges, THT, pitch 5.08mm, 16p; Manufacturer: Wurth Elektronik; Modularity: No; Rated Current: 20A; Working Voltage: 300V (AC); Manufacturer Part Number: 691333500016; Product Series: WR-TBL; ComponentLink1Description: Website Link; ComponentLink1URL: https://www.we-online.com; ComponentLink2Description: Datasheet Link; ComponentLink2URL: https://www.we-online.com/components/products/datasheet/691333500016; Mount: Through Hole; Operating Temperature Min: -40degC; Operating Temperature Max: 105degC; Packaging: Box; Application: Pluggable; Number of Pins: 16; Number of Rows: 2; Orientation: Double Level Vertical; Lead Pitch: 5.08mm
footprint 691333500016
pins: 1, 2, 3, 4, 5, 6, 7, 8, 9, 10, 11, 12, 13, 14, 15, 16

## 691334500004
designator P?  (value not drawn)
WR-TBL Series 3345 Double Level Vertical PCB Header with Flanges & Nut Type, THT, pitch 5.08mm, 04p; Manufacturer: Wurth Elektronik; Modularity: No; Rated Current: 20A; Working Voltage: 300V (AC); Manufacturer Part Number: 691334500004; Product Series: WR-TBL; ComponentLink1Description: Website Link; ComponentLink1URL: https://www.we-online.com; ComponentLink2Description: Datasheet Link; ComponentLink2URL: https://www.we-online.com/components/products/datasheet/691334500004; Mount: Through Hole; Operating Temperature Min: -40degC; Operating Temperature Max: 105degC; Packaging: Box; Application: Pluggable; Number of Pins: 4; Number of Rows: 2; Orientation: Double Level Vertical; Lead Pitch: 5.08mm
footprint 691334500004
pins: 1, 2, 3, 4

## 691334500006
designator P?  (value not drawn)
WR-TBL Series 3345 Double Level Vertical PCB Header with Flanges & Nut Type, THT, pitch 5.08mm, 06p; Manufacturer: Wurth Elektronik; Modularity: No; Rated Current: 20A; Working Voltage: 300V (AC); Manufacturer Part Number: 691334500006; Product Series: WR-TBL; ComponentLink1Description: Website Link; ComponentLink1URL: https://www.we-online.com; ComponentLink2Description: Datasheet Link; ComponentLink2URL: https://www.we-online.com/components/products/datasheet/691334500006; Mount: Through Hole; Operating Temperature Min: -40degC; Operating Temperature Max: 105degC; Packaging: Box; Application: Pluggable; Number of Pins: 6; Number of Rows: 2; Orientation: Double Level Vertical; Lead Pitch: 5.08mm
footprint 691334500006
pins: 1, 2, 3, 4, 5, 6

## 691334500008
designator P?  (value not drawn)
WR-TBL Series 3345 Double Level Vertical PCB Header with Flanges & Nut Type, THT, pitch 5.08mm, 08p; Manufacturer: Wurth Elektronik; Modularity: No; Rated Current: 20A; Working Voltage: 300V (AC); Manufacturer Part Number: 691334500008; Product Series: WR-TBL; ComponentLink1Description: Website Link; ComponentLink1URL: https://www.we-online.com; ComponentLink2Description: Datasheet Link; ComponentLink2URL: https://www.we-online.com/components/products/datasheet/691334500008; Mount: Through Hole; Operating Temperature Min: -40degC; Operating Temperature Max: 105degC; Packaging: Box; Application: Pluggable; Number of Pins: 8; Number of Rows: 2; Orientation: Double Level Vertical; Lead Pitch: 5.08mm
footprint 691334500008
pins: 1, 2, 3, 4, 5, 6, 7, 8

## 691334500010
designator P?  (value not drawn)
WR-TBL Series 3345 Double Level Vertical PCB Header with Flanges & Nut Type, THT, pitch 5.08mm, 10p; Manufacturer: Wurth Elektronik; Modularity: No; Rated Current: 20A; Working Voltage: 300V (AC); Manufacturer Part Number: 691334500010; Product Series: WR-TBL; ComponentLink1Description: Website Link; ComponentLink1URL: https://www.we-online.com; ComponentLink2Description: Datasheet Link; ComponentLink2URL: https://www.we-online.com/components/products/datasheet/691334500010; Mount: Through Hole; Operating Temperature Min: -40degC; Operating Temperature Max: 105degC; Packaging: Box; Application: Pluggable; Number of Pins: 10; Number of Rows: 2; Orientation: Double Level Vertical; Lead Pitch: 5.08mm
footprint 691334500010
pins: 1, 2, 3, 4, 5, 6, 7, 8, 9, 10

## 691334500012
designator P?  (value not drawn)
WR-TBL Series 3345 Double Level Vertical PCB Header with Flanges & Nut Type, THT, pitch 5.08mm, 12p; Manufacturer: Wurth Elektronik; Modularity: No; Rated Current: 20A; Working Voltage: 300V (AC); Manufacturer Part Number: 691334500012; Product Series: WR-TBL; ComponentLink1Description: Website Link; ComponentLink1URL: https://www.we-online.com; ComponentLink2Description: Datasheet Link; ComponentLink2URL: https://www.we-online.com/components/products/datasheet/691334500012; Mount: Through Hole; Operating Temperature Min: -40degC; Operating Temperature Max: 105degC; Packaging: Box; Application: Pluggable; Number of Pins: 12; Number of Rows: 2; Orientation: Double Level Vertical; Lead Pitch: 5.08mm
footprint 691334500012
pins: 1, 2, 3, 4, 5, 6, 7, 8, 9, 10, 11, 12

## 691334500014
designator P?  (value not drawn)
WR-TBL Series 3345 Double Level Vertical PCB Header with Flanges & Nut Type, THT, pitch 5.08mm, 14p; Manufacturer: Wurth Elektronik; Modularity: No; Rated Current: 20A; Working Voltage: 300V (AC); Manufacturer Part Number: 691334500014; Product Series: WR-TBL; ComponentLink1Description: Website Link; ComponentLink1URL: https://www.we-online.com; ComponentLink2Description: Datasheet Link; ComponentLink2URL: https://www.we-online.com/components/products/datasheet/691334500014; Mount: Through Hole; Operating Temperature Min: -40degC; Operating Temperature Max: 105degC; Packaging: Box; Application: Pluggable; Number of Pins: 14; Number of Rows: 2; Orientation: Double Level Vertical; Lead Pitch: 5.08mm
footprint 691334500014
pins: 1, 2, 3, 4, 5, 6, 7, 8, 9, 10, 11, 12, 13, 14

## 691334500016
designator P?  (value not drawn)
WR-TBL Series 3345 Double Level Vertical PCB Header with Flanges & Nut Type, THT, pitch 5.08mm, 16p; Manufacturer: Wurth Elektronik; Modularity: No; Rated Current: 20A; Working Voltage: 300V (AC); Manufacturer Part Number: 691334500016; Product Series: WR-TBL; ComponentLink1Description: Website Link; ComponentLink1URL: https://www.we-online.com; ComponentLink2Description: Datasheet Link; ComponentLink2URL: https://www.we-online.com/components/products/datasheet/691334500016; Mount: Through Hole; Operating Temperature Min: -40degC; Operating Temperature Max: 105degC; Packaging: Box; Application: Pluggable; Number of Pins: 16; Number of Rows: 2; Orientation: Double Level Vertical; Lead Pitch: 5.08mm
footprint 691334500016
pins: 1, 2, 3, 4, 5, 6, 7, 8, 9, 10, 11, 12, 13, 14, 15, 16

## 691334500018
designator P?  (value not drawn)
WR-TBL Series 3345 Double Level Vertical PCB Header with Flanges & Nut Type, THT, pitch 5.08mm, 18p; Manufacturer: Wurth Elektronik; Modularity: No; Rated Current: 20A; Working Voltage: 300V (AC); Manufacturer Part Number: 691334500018; Product Series: WR-TBL; ComponentLink1Description: Website Link; ComponentLink1URL: https://www.we-online.com; ComponentLink2Description: Datasheet Link; ComponentLink2URL: https://www.we-online.com/components/products/datasheet/691334500018; Mount: Through Hole; Operating Temperature Min: -40degC; Operating Temperature Max: 105degC; Packaging: Box; Application: Pluggable; Number of Pins: 18; Number of Rows: 2; Orientation: Double Level Vertical; Lead Pitch: 5.08mm
footprint 691334500018
pins: 1, 2, 3, 4, 5, 6, 7, 8, 9, 10, 11, 12, 13, 14, 15, 16, 17, 18

## 691334500020
designator P?  (value not drawn)
WR-TBL Series 3345 Double Level Vertical PCB Header with Flanges & Nut Type, THT, pitch 5.08mm, 20p; Manufacturer: Wurth Elektronik; Modularity: No; Rated Current: 20A; Working Voltage: 300V (AC); Manufacturer Part Number: 691334500020; Product Series: WR-TBL; ComponentLink1Description: Website Link; ComponentLink1URL: https://www.we-online.com; ComponentLink2Description: Datasheet Link; ComponentLink2URL: https://www.we-online.com/components/products/datasheet/691334500020; Mount: Through Hole; Operating Temperature Min: -40degC; Operating Temperature Max: 105degC; Packaging: Box; Application: Pluggable; Number of Pins: 20; Number of Rows: 2; Orientation: Double Level Vertical; Lead Pitch: 5.08mm
footprint 691334500020
pins: 1, 2, 3, 4, 5, 6, 7, 8, 9, 10, 11, 12, 13, 14, 15, 16, 17, 18, 19, 20

## 691335510004
designator P?  (value not drawn)
WR-TBL Series 3355 Double Level Horizontal PCB Header Modular, THT, pitch 5.08mm, 04p; Manufacturer: Wurth Elektronik; Modularity: Yes; Rated Current: 10A; Working Voltage: 300V (AC); Manufacturer Part Number: 691335510004; Product Series: WR-TBL; ComponentLink1Description: Website Link; ComponentLink1URL: https://www.we-online.com; ComponentLink2Description: Datasheet Link; ComponentLink2URL: https://www.we-online.com/components/products/datasheet/691335510004; Mount: Through Hole; Operating Temperature Min: -40degC; Operating Temperature Max: 105degC; Packaging: Box; Application: Pluggable; Number of Pins: 4; Number of Rows: 2; Orientation: Double Level Horizontal; Lead Pitch: 5.08mm
footprint 691335510004
pins: 1, 2, 3, 4

## 691335510006
designator P?  (value not drawn)
WR-TBL Series 3355 Double Level Horizontal PCB Header Modular, THT, pitch 5.08mm, 06p; Manufacturer: Wurth Elektronik; Modularity: Yes; Rated Current: 10A; Working Voltage: 300V (AC); Manufacturer Part Number: 691335510006; Product Series: WR-TBL; ComponentLink1Description: Website Link; ComponentLink1URL: https://www.we-online.com; ComponentLink2Description: Datasheet Link; ComponentLink2URL: https://www.we-online.com/components/products/datasheet/691335510006; Mount: Through Hole; Operating Temperature Min: -40degC; Operating Temperature Max: 105degC; Packaging: Box; Application: Pluggable; Number of Pins: 6; Number of Rows: 2; Orientation: Double Level Horizontal; Lead Pitch: 5.08mm
footprint 691335510006
pins: 1, 2, 3, 4, 5, 6

## 691335510008
designator P?  (value not drawn)
WR-TBL Series 3355 Double Level Horizontal PCB Header Modular, THT, pitch 5.08mm, 08p; Manufacturer: Wurth Elektronik; Modularity: Yes; Rated Current: 10A; Working Voltage: 300V (AC); Manufacturer Part Number: 691335510008; Product Series: WR-TBL; ComponentLink1Description: Website Link; ComponentLink1URL: https://www.we-online.com; ComponentLink2Description: Datasheet Link; ComponentLink2URL: https://www.we-online.com/components/products/datasheet/691335510008; Mount: Through Hole; Operating Temperature Min: -40degC; Operating Temperature Max: 105degC; Packaging: Box; Application: Pluggable; Number of Pins: 8; Number of Rows: 2; Orientation: Double Level Horizontal; Lead Pitch: 5.08mm
footprint 691335510008
pins: 1, 2, 3, 4, 5, 6, 7, 8

## 691335510010
designator P?  (value not drawn)
WR-TBL Series 3355 Double Level Horizontal PCB Header Modular, THT, pitch 5.08mm, 10p; Manufacturer: Wurth Elektronik; Modularity: Yes; Rated Current: 10A; Working Voltage: 300V (AC); Manufacturer Part Number: 691335510010; Product Series: WR-TBL; ComponentLink1Description: Website Link; ComponentLink1URL: https://www.we-online.com; ComponentLink2Description: Datasheet Link; ComponentLink2URL: https://www.we-online.com/components/products/datasheet/691335510010; Mount: Through Hole; Operating Temperature Min: -40degC; Operating Temperature Max: 105degC; Packaging: Box; Application: Pluggable; Number of Pins: 10; Number of Rows: 2; Orientation: Double Level Horizontal; Lead Pitch: 5.08mm
footprint 691335510010
pins: 1, 2, 3, 4, 5, 6, 7, 8, 9, 10